# Altium footprint library Footprint-Lib-PhilsLab.PcbLib: 352 footprints (part 5 of 22)
Each footprint in its own frame and in the unit in brackets; x right, y up, seen from the top. Pads: shape width x height; smd on the part's side, far side on the other; paste and mask are expansions set on the pad; w line width, h text height; cw(c..) or ccw(c..) is an arc to the next point about the centre after c.
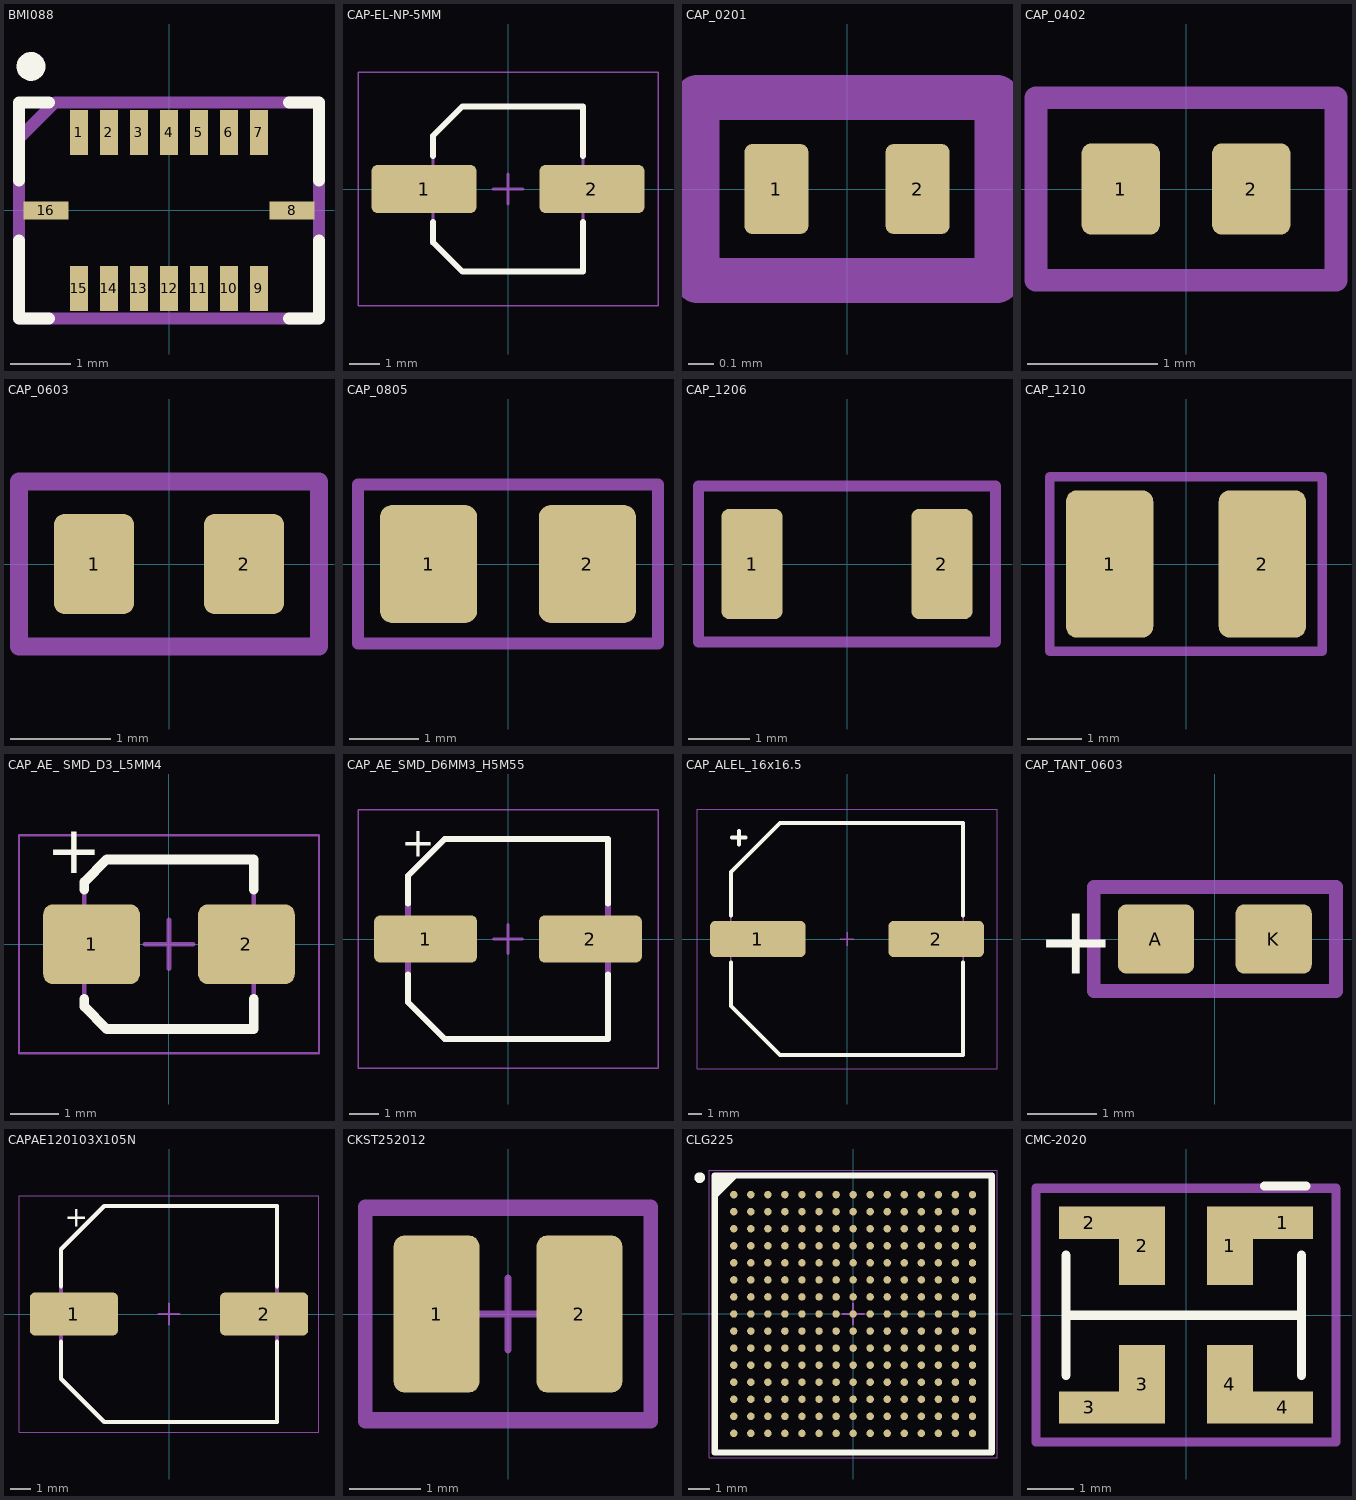
[diagram p4: the footprints below, top view; thin cyan lines are the x and y axes]

## BMI088 [mm]
pads (16):
  rect 0.3x0.75 smd: 1(-1.5,1.3) 2(-1,1.3) 3(-0.5,1.3) 4(0,1.3) 5(0.5,1.3) 6(1,1.3) 7(1.5,1.3) 9(1.5,-1.3) 10(1,-1.3) 11(0.5,-1.3) 12(0,-1.3) 13(-0.5,-1.3) 14(-1,-1.3) 15(-1.5,-1.3)
  rect 0.75x0.3 smd: 8(2.05,0) 16(-2.05,0)
Top Overlay:
  circle w0.254: c-2.3,2.4 r0.114
  lines w0.2: -2.5,-0.5 -2.5,-1.8 -2,-1.8 ; -2.5,0.5 -2.5,1.8 -2,1.8 ; 2,-1.8 2.5,-1.8 2.5,-0.5 ; 2,1.8 2.5,1.8 2.5,0.5
Mechanical 13:
  lines w0.2: -2.5,-1.8 -2.5,1.2 -1.9,1.8 2.5,1.8 2.5,-1.8 -2.5,-1.8
  text "'.Designator'" at -5.665,-0.417 h1
3D body "BMI088.STEP": height 1.01, standoff 0.01, extent -2.25,-1.5 2.25,1.5

## CAP-EL-NP-5MM [mm]
height 6.1
pads (2):
  rrect25% 3.5x1.6 smd: 1(-2.8,0) 2(2.8,0)
Top Overlay:
  lines w0.2: -2.5,-1.1 -2.5,-1.775 -1.525,-2.75 2.5,-2.75 2.5,-1.1 ; -2.5,1.1 -2.5,1.775 -1.525,2.75 2.5,2.75 2.5,1.1
Mechanical 13:
  lines w0.1: -2.5,-1.775 -2.5,1.775 -1.525,2.75 2.5,2.75 2.5,-2.75 -1.525,-2.75 -2.5,-1.775
  text "'.Designator'" at -6.315,-1.4 h1
Mechanical 15:
  lines w0.05: -5,-3.9 5,-3.9 5,3.9 -5,3.9 -5,-3.9
  lines w0.1: -0.5,0 0.5,0 ; 0,-0.5 0,0.5
3D body "CAP-EL-NP-5MM.step": height 6.1, standoff 0, extent -2.65,-2.75 2.65,2.75

## CAP_0201 [mm]
pads (2):
  rrect25% 0.25x0.35 smd mask+0.05: 1(-0.275,0) 2(0.275,0)
Mechanical 13:
  lines w0.175: -0.584,-0.356 -0.584,0.356 0.584,0.356 0.584,-0.356 -0.584,-0.356
  text "'.Designator'" at -5.665,-0.417 h1
3D body "C0201.stp": height 0.34, standoff 0.01, extent -0.315,-0.166 0.315,0.164

## CAP_0402 [mm]
pads (2):
  rrect25% 0.6x0.7 smd: 1(-0.5,0) 2(0.5,0)
Mechanical 13:
  lines w0.175: -1.15,-0.7 1.15,-0.7 1.15,0.7 -1.15,0.7 -1.15,-0.7
  text "'.Designator'" at -5.665,-0.29 h1
3D body "C0402.step": height 0.37, standoff 0.01, extent -0.5,-0.265 0.5,0.265

## CAP_0603 [mm]
pads (2):
  rrect25% 0.8x1 smd: 1(-0.75,0) 2(0.75,0)
Mechanical 13:
  lines w0.175: -1.5,-0.825 -1.5,0.825 1.5,0.825 1.5,-0.825 -1.5,-0.825
  text "'.Designator'" at -5.665,-0.417 h1
3D body "C0603.step": height 0.51, standoff 0.01, extent -0.8,-0.4 0.8,0.4

## CAP_0805 [mm]
pads (2):
  rrect25% 1.4x1.7 smd: 1(-1.143,0) 2(1.143,0)
Mechanical 13:
  lines w0.175: -2.159,-1.143 -2.159,1.143 2.159,1.143 2.159,-1.143 -2.159,-1.143
  text "'.Designator'" at -5.665,-0.417 h1
3D body "C0805.stp": height 1.01, standoff 0.01, extent -1.15,-0.762 1.15,0.788

## CAP_1206 [mm]
pads (2):
  rrect25% 1x1.8 smd: 1(-1.55,0) 2(1.55,0)
Mechanical 13:
  lines w0.175: -2.425,-1.275 2.425,-1.275 2.425,1.275 -2.425,1.275 -2.425,-1.275
  text "'.Designator'" at -5.665,-0.417 h1
3D body "C1206.step": height 0.94, standoff 0, extent -1.6,-0.8 1.6,0.8

## CAP_1210 [mm]
height 1.35
pads (2):
  rrect25% 1.6x2.7 smd: 1(-1.4,0) 2(1.4,0)
Mechanical 13:
  lines w0.175: -2.5,-1.6 2.5,-1.6 2.5,1.6 -2.5,1.6 -2.5,-1.6
  text "'.Designator'" at -5.665,-0.417 h1
3D body "C1210.step": height 2.5, standoff 0, extent -1.6,-1.25 1.6,1.25

## CAP_AE_ SMD_D3_L5MM4 [mm] "Aluminum Electrolytic Capacitor, Body 3.30x3.30x5.50mm, IPC Medium Density"
height 5.5
pads (2):
  rrect25% 2x1.65 smd: 1(-1.6,0) 2(1.6,0)
Top Overlay:
  lines w0.2: -1.75,-1.125 -1.75,-1.288 -1.288,-1.75 1.75,-1.75 1.75,-1.125 ; -1.75,1.125 -1.75,1.288 -1.288,1.75 1.75,1.75 1.75,1.125
  text "+" at -2.533,1.467 h1
Mechanical 13:
  lines w0.1: -1.75,-1.288 -1.75,1.288 -1.288,1.75 1.75,1.75 1.75,-1.75 -1.288,-1.75 -1.75,-1.288
  text "+" at -2.483,1.508 h1
  text "'.Designator'" at -5.815,-0.9 h1
Mechanical 15:
  lines w0.05: -3.1,-2.25 3.1,-2.25 3.1,2.25 -3.1,2.25 -3.1,-2.25
  lines w0.1: -0.5,0 0.5,0 ; 0,-0.5 0,0.5
3D body "CAP_AE_ SMD_D3_L5MM4.step": height 5.5, standoff 0, extent -1.9,-1.75 1.9,1.75

## CAP_AE_SMD_D6MM3_H5M55 [mm] "Aluminum Electrolytic Capacitor, Body 6.30x6.60x5.50mm, IPC Low Density"
height 5.5
pads (2):
  rrect25% 3.5x1.6 smd: 1(-2.8,0) 2(2.8,0)
Top Overlay:
  lines w0.2: -3.4,-1.2 -3.4,-2.15 -2.15,-3.4 3.4,-3.4 3.4,-1.2 ; -3.4,1.2 -3.4,2.15 -2.15,3.4 3.4,3.4 3.4,1.2
  text "+" at -3.633,2.8 h1
Mechanical 13:
  lines w0.2: -3.4,-2.15 -2.15,-3.4 3.4,-3.4 3.4,3.4 -2.15,3.4 -3.4,2.15 -3.4,-2.15
  text ".Designator" at -4.998,-0.333 h1
  text "+" at -3.633,2.8 h1
Mechanical 15:
  lines w0.05: -5.1,-4.4 -5.1,4.4 5.1,4.4 5.1,-4.4 -5.1,-4.4
  lines w0.1: -0.5,0 0.5,0 ; 0,-0.5 0,0.5
3D body "CAP_AE_SMD_D6MM3_H5M55.step": height 5.5, standoff -0.8, extent -3.4,-3.4 3.4,3.4

## CAP_ALEL_16x16.5 [mm] "Aluminum Electrolytic Capacitor, Body 17.00x17.00x17.00mm, IPC Low Density"
height 17
pads (2):
  rrect25% 7.05x2.65 smd: 1(-6.6,0) 2(6.6,0)
Top Overlay:
  lines w0.3: -8.6,-1.75 -8.6,-4.962 -4.962,-8.6 8.6,-8.6 8.6,-1.75 ; -8.6,1.75 -8.6,4.963 -4.962,8.6 8.6,8.6 8.6,1.75 ; -8.5,7.5 -7.5,7.5 ; -8,7 -8,8
Mechanical 13:
  lines w0.1: -8.6,-4.962 -4.962,-8.6 8.6,-8.6 8.6,8.6 -4.962,8.6 -8.6,4.963 -8.6,-4.962
  text "'.Designator'" at -5.815,-0.9 h1
  text "+" at -8.966,6.517 h2
Mechanical 15:
  lines w0.05: -11.1,-9.6 -11.1,9.6 11.1,9.6 11.1,-9.6 -11.1,-9.6
  lines w0.1: -0.5,0 0.5,0 ; 0,-0.5 0,0.5
3D body "CAPAE180170X170M.step": height 17, standoff 0, extent -9,-8.6 9,8.6

## CAP_TANT_0603 [mm]
pads (2):
  rrect25% 1.1x1 smd: A(-0.85,0) K(0.85,0)
Top Overlay:
  text "+" at -2.583,-0.5 h1
Mechanical 13:
  lines w0.2: -1.75,-0.75 -1.75,0.75 1.75,0.75 1.75,-0.75 -1.75,-0.75
  text "+" at -1.333,1 h1
  text ".Designator" at -4.998,-0.333 h1
3D body "CAP_TANT_0603.step": height 0.91, standoff 0.01, extent -0.9,-0.525 0.9,0.525

## CAPAE120103X105N [mm] "Aluminum Electrolytic Capacitor, Body 10.30x10.30x10.50mm, IPC Medium Density"
height 10.5
pads (2):
  rrect25% 4.3x2.1 smd: 1(-4.625,0) 2(4.625,0)
Top Overlay:
  lines w0.2: -5.25,-1.35 -5.25,-3.15 -3.15,-5.25 5.25,-5.25 5.25,-1.35 ; -5.25,1.35 -5.25,3.15 -3.15,5.25 5.25,5.25 5.25,1.35
  text "+" at -5.083,4.25 h1
Mechanical 13:
  lines w0.2: -5.25,-3.15 -3.15,-5.25 5.25,-5.25 5.25,5.25 -3.15,5.25 -5.25,3.15 -5.25,-3.15
  text "'.Designator'" at -5.665,-0.417 h1
  text "+" at -5.083,4.25 h1
Mechanical 15:
  lines w0.05: -7.3,-5.75 -7.3,5.75 7.3,5.75 7.3,-5.75 -7.3,-5.75
  lines w0.1: -0.5,0 0.5,0 ; 0,-0.5 0,0.5
3D body "CAPAE120103X105N.step": height 10.5, standoff 0, extent -6,-5.25 6,5.25

## CKST252012 [mm]
height 1.2
pads (2):
  rrect25% 1.2x2.2 smd: 1(-1,0) 2(1,0)
Mechanical 13:
  lines w0.2: -2,-1.5 -2,1.5 2,1.5 2,-1.5 -2,-1.5
  text "'.Designator'" at -5.665,-0.417 h1
Mechanical 15:
  lines w0.05: -1.95,-1.4 -1.95,1.4 1.95,1.4 1.95,-1.4 -1.95,-1.4
  lines w0.1: -0.5,0 0.5,0 ; 0,-0.5 0,0.5
3D body "CKST252012.step": height 1.2, standoff 0, extent -1.35,-1.1 1.35,1.1

## CLG225 [mm] "BGA, 225-Leads, Body 13.00x13.00mmx1.50mm, Pitch 0.80mm"
height 1.5
pads (225):
  round 0.35 smd mask+0.03: A1(-5.6,5.6) A2(-4.8,5.6) A3(-4,5.6) A4(-3.2,5.6) A5(-2.4,5.6) A6(-1.6,5.6) A7(-0.8,5.6) A8(0,5.6) A9(0.8,5.6) A10(1.6,5.6) A11(2.4,5.6) A12(3.2,5.6) A13(4,5.6) A14(4.8,5.6) A15(5.6,5.6) B1(-5.6,4.8) B2(-4.8,4.8) B3(-4,4.8) B4(-3.2,4.8) B5(-2.4,4.8) B6(-1.6,4.8) B7(-0.8,4.8) B8(0,4.8) B9(0.8,4.8) B10(1.6,4.8) B11(2.4,4.8) B12(3.2,4.8) B13(4,4.8) B14(4.8,4.8) B15(5.6,4.8) C1(-5.6,4) C2(-4.8,4) C3(-4,4) C4(-3.2,4) C5(-2.4,4) C6(-1.6,4) C7(-0.8,4) C8(0,4) C9(0.8,4) C10(1.6,4) C11(2.4,4) C12(3.2,4) C13(4,4) C14(4.8,4) C15(5.6,4) D1(-5.6,3.2) D2(-4.8,3.2) D3(-4,3.2) D4(-3.2,3.2) D5(-2.4,3.2) D6(-1.6,3.2) D7(-0.8,3.2) D8(0,3.2) D9(0.8,3.2) D10(1.6,3.2) D11(2.4,3.2) D12(3.2,3.2) D13(4,3.2) D14(4.8,3.2) D15(5.6,3.2) E1(-5.6,2.4) E2(-4.8,2.4) E3(-4,2.4) E4(-3.2,2.4) E5(-2.4,2.4) E6(-1.6,2.4) E7(-0.8,2.4) E8(0,2.4) E9(0.8,2.4) E10(1.6,2.4) E11(2.4,2.4) E12(3.2,2.4) E13(4,2.4) E14(4.8,2.4) E15(5.6,2.4) F1(-5.6,1.6) F2(-4.8,1.6) F3(-4,1.6) F4(-3.2,1.6) F5(-2.4,1.6) F6(-1.6,1.6) F7(-0.8,1.6) F8(0,1.6) F9(0.8,1.6) F10(1.6,1.6) F11(2.4,1.6) F12(3.2,1.6) F13(4,1.6) F14(4.8,1.6) F15(5.6,1.6) G1(-5.6,0.8) G2(-4.8,0.8) G3(-4,0.8) G4(-3.2,0.8) G5(-2.4,0.8) G6(-1.6,0.8) G7(-0.8,0.8) G8(0,0.8) G9(0.8,0.8) G10(1.6,0.8) G11(2.4,0.8) G12(3.2,0.8) G13(4,0.8) G14(4.8,0.8) G15(5.6,0.8) H1(-5.6,0) H2(-4.8,0) H3(-4,0) H4(-3.2,0) H5(-2.4,0) H6(-1.6,0) H7(-0.8,0) H8(0,0) H9(0.8,0) H10(1.6,0) H11(2.4,0) H12(3.2,0) H13(4,0) H14(4.8,0) H15(5.6,0) J1(-5.6,-0.8) J2(-4.8,-0.8) J3(-4,-0.8) J4(-3.2,-0.8) J5(-2.4,-0.8) J6(-1.6,-0.8) J7(-0.8,-0.8) J8(0,-0.8) J9(0.8,-0.8) J10(1.6,-0.8) J11(2.4,-0.8) J12(3.2,-0.8) J13(4,-0.8) J14(4.8,-0.8) J15(5.6,-0.8) K1(-5.6,-1.6) K2(-4.8,-1.6) K3(-4,-1.6) K4(-3.2,-1.6) K5(-2.4,-1.6) K6(-1.6,-1.6) K7(-0.8,-1.6) K8(0,-1.6) K9(0.8,-1.6) K10(1.6,-1.6) K11(2.4,-1.6) K12(3.2,-1.6) K13(4,-1.6) K14(4.8,-1.6) K15(5.6,-1.6) L1(-5.6,-2.4) L2(-4.8,-2.4) L3(-4,-2.4) L4(-3.2,-2.4) L5(-2.4,-2.4) L6(-1.6,-2.4) L7(-0.8,-2.4) L8(0,-2.4) L9(0.8,-2.4) L10(1.6,-2.4) L11(2.4,-2.4) L12(3.2,-2.4) L13(4,-2.4) L14(4.8,-2.4) L15(5.6,-2.4) M1(-5.6,-3.2) M2(-4.8,-3.2) M3(-4,-3.2) M4(-3.2,-3.2) M5(-2.4,-3.2) M6(-1.6,-3.2) M7(-0.8,-3.2) M8(0,-3.2) M9(0.8,-3.2) M10(1.6,-3.2) M11(2.4,-3.2) M12(3.2,-3.2) M13(4,-3.2) M14(4.8,-3.2) M15(5.6,-3.2) N1(-5.6,-4) N2(-4.8,-4) N3(-4,-4) N4(-3.2,-4) N5(-2.4,-4) N6(-1.6,-4) N7(-0.8,-4) N8(0,-4) N9(0.8,-4) N10(1.6,-4) N11(2.4,-4) N12(3.2,-4) N13(4,-4) N14(4.8,-4) N15(5.6,-4) P1(-5.6,-4.8) P2(-4.8,-4.8) P3(-4,-4.8) P4(-3.2,-4.8) P5(-2.4,-4.8) P6(-1.6,-4.8) P7(-0.8,-4.8) P8(0,-4.8) P9(0.8,-4.8) P10(1.6,-4.8) P11(2.4,-4.8) P12(3.2,-4.8) P13(4,-4.8) P14(4.8,-4.8) P15(5.6,-4.8) R1(-5.6,-5.6) R2(-4.8,-5.6) R3(-4,-5.6) R4(-3.2,-5.6) R5(-2.4,-5.6) R6(-1.6,-5.6) R7(-0.8,-5.6) R8(0,-5.6) R9(0.8,-5.6) R10(1.6,-5.6) R11(2.4,-5.6) R12(3.2,-5.6) R13(4,-5.6) R14(4.8,-5.6) R15(5.6,-5.6)
Top Overlay:
  circle w0.25: c-7.2,6.4 r0.125
  region: -5.549,6.5 -6.5,5.549 -6.5,6.5
  lines w0.3: -6.5,5.549 -5.549,6.5 ; -6.5,-6.5 -6.5,6.5 6.5,6.5 6.5,-6.5 -6.5,-6.5
Mechanical 13:
  lines w0.1: -6.5,-6.5 -6.5,6.5 6.5,6.5 6.5,-6.5 -6.5,-6.5
Mechanical 15:
  lines w0.05: -6.75,-6.75 -6.75,6.75 6.75,6.75 6.75,-6.75 -6.75,-6.75
  lines w0.1: -0.5,0 0.5,0 ; 0,-0.5 0,0.5
3D body "CLG225.step": height 1.5, standoff 0, extent -6.5,-6.5 6.5,6.5

## CMC-2020 [mm]
height 2.5
pads (8):
  rect 1x1.7 smd: 1(0.95,1.5) 2(-0.95,1.5) 3(-0.95,-1.5) 4(0.95,-1.5)
  rect 1.3x0.7 smd: 1(2.1,2) 2(-2.1,2) 3(-2.1,-2) 4(2.1,-2)
Top Overlay:
  lines w0.2: -2.6,-1.3 -2.6,1.3 ; -2.6,0 2.5,0 ; 1.7,2.8 2.6,2.8 ; 2.5,-1.3 2.5,1.3
Mechanical 13:
  circle w0.35: c2.25,2 r0.15
  lines w0.2: -3.25,-2.75 3.25,-2.75 3.25,2.75 -3.25,2.75 -3.25,-2.75
  text "'.Designator'" at -5.665,-0.417 h1
3D body "DLW5BTM251SQ2L.STEP": height 2.51, standoff 0.01, extent -2.5,-2.5 2.5,2.5